# Altium footprint library PcbLib_BDD.PcbLib: 9 footprints
Each footprint in its own frame and in the unit in brackets; x right, y up, seen from the top. Pads: shape width x height; smd on the part's side, far side on the other; paste and mask are expansions set on the pad; w line width, h text height; cw(c..) or ccw(c..) is an arc to the next point about the centre after c.
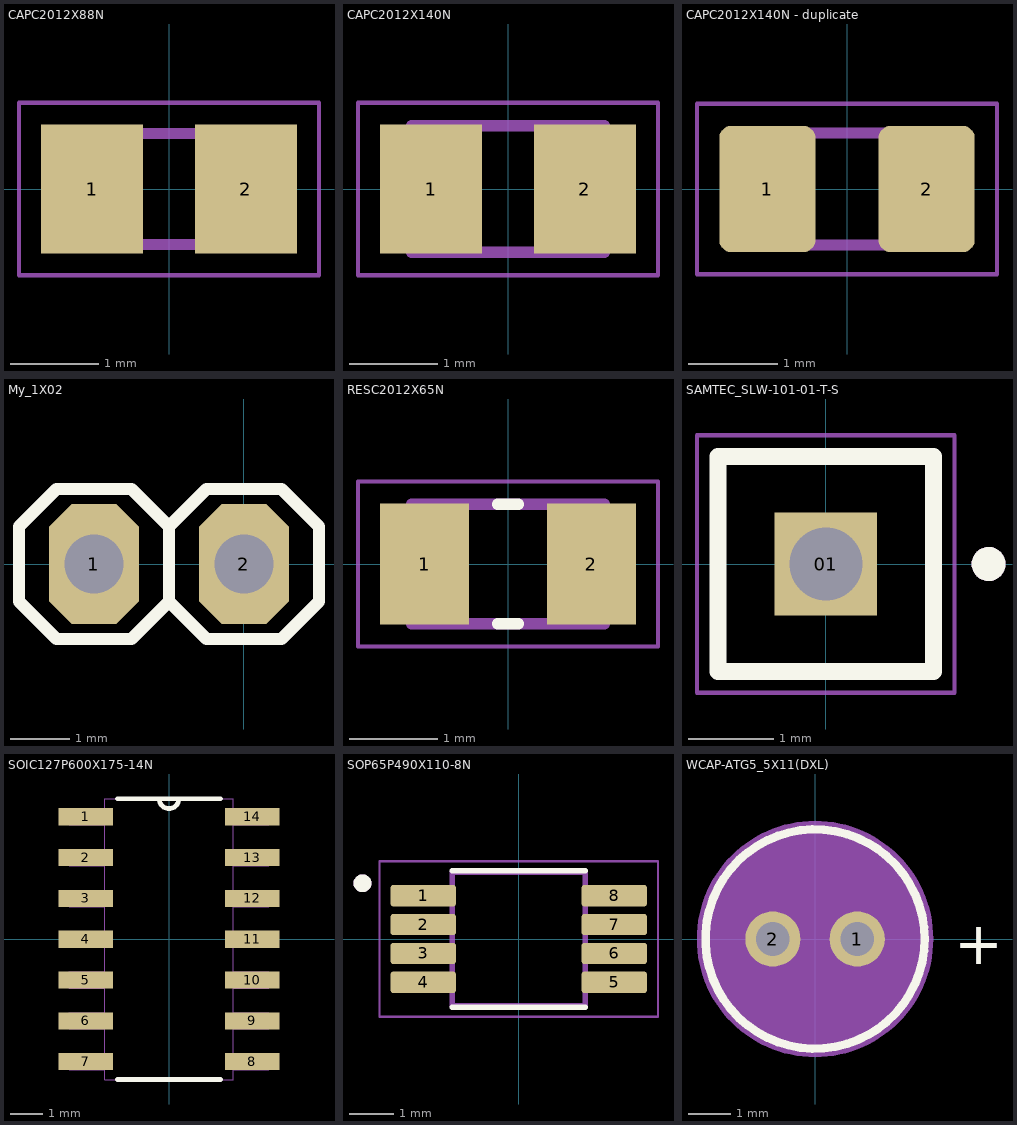
[diagram p0: the footprints below, top view; thin cyan lines are the x and y axes]

## CAPC2012X88N [mm]
pads (2):
  rect 1.16x1.47 smd: 1(-0.875,0) 2(0.875,0)
Mechanical 13:
  lines w0.127: -1,-0.63 -1,0.63 1,0.63 1,-0.63 -1,-0.63
Mechanical 15:
  lines w0.05: -1.708,-0.983 -1.708,0.983 1.708,0.983 1.708,-0.983 -1.708,-0.983
3D body "step_temp.STEP": height 0.88, standoff 0, extent -1,-0.625 1,0.625

## CAPC2012X140N [mm]
pads (2):
  rect 1.16x1.47 smd: 1(-0.875,0) 2(0.875,0)
Mechanical 13:
  lines w0.127: -1.1,-0.72 -1.1,0.72 1.1,0.72 1.1,-0.72 -1.1,-0.72
Mechanical 15:
  lines w0.05: -1.708,-0.983 -1.708,0.983 1.708,0.983 1.708,-0.983 -1.708,-0.983
3D body "step_temp.STEP": height 0.88, standoff 0, extent -1,-0.625 1,0.625

## CAPC2012X140N - duplicate [mm]
pads (2):
  rrect25% 1.08x1.42 smd: 1(-0.895,0) 2(0.895,0)
Mechanical 13:
  lines w0.127: -1,-0.63 -1,0.63 1,0.63 1,-0.63 -1,-0.63
Mechanical 15:
  lines w0.05: -1.685,-0.96 -1.685,0.96 1.685,0.96 1.685,-0.96 -1.685,-0.96
3D body "step_temp.STEP": height 1.4, standoff 0, extent -1,-0.625 1,0.625

## My_1X02 [mil]
pads (2):
  oct 60x80 hole 39.37: 1(-100,0) 2(0,0)
Top Overlay:
  lines w8: -50,-25 -25,-50 25,-50 50,-25 50,25 25,50 -25,50 -50,25 ; -50,-25 -75,-50 -125,-50 -150,-25 -150,25 -125,50 -75,50 -50,25 ; -50,-25 -50,25
3D body "pin_header_aw140-eg-g02d.stp": height 323.43, standoff -117.51, extent -150,-51.21 46.07,47.22

## RESC2012X65N [mm]
pads (2):
  rect 1.01x1.38 smd: 1(-0.95,0) 2(0.95,0)
Top Overlay:
  lines w0.127: -0.12,-0.68 0.12,-0.68 ; -0.12,0.68 0.12,0.68
Mechanical 13:
  lines w0.127: -1.1,-0.68 -1.1,0.68 1.1,0.68 1.1,-0.68 -1.1,-0.68
Mechanical 15:
  lines w0.05: -1.708,-0.94 -1.708,0.94 1.708,0.94 1.708,-0.94 -1.708,-0.94

## SAMTEC_SLW-101-01-T-S [mm]
pads (1):
  rect 1.21x1.21 hole 0.86: 01(0,0)
Top Overlay:
  circle w0.2: c1.92,0 r0.1
  lines w0.2: -1.27,-1.27 1.27,-1.27 1.27,1.27 -1.27,1.27 -1.27,-1.27
Mechanical 13:
  circle w0.2: c1.92,0 r0.1
  lines w0.1: -1.27,-1.27 1.27,-1.27 1.27,1.27 -1.27,1.27 -1.27,-1.27
Mechanical 15:
  lines w0.05: -1.52,-1.52 1.52,-1.52 1.52,1.52 -1.52,1.52 -1.52,-1.52

## SOIC127P600X175-14N [mil]
pads (14):
  rect 67x21 smd paste+0 mask+4.02: 1(-102,150) 2(-102,100) 3(-102,50) 4(-102,0) 5(-102,-50) 6(-102,-100) 7(-102,-150) 8(102,-150) 9(102,-100) 10(102,-50) 11(102,0) 12(102,50) 13(102,100) 14(102,150)
Top Overlay:
  lines w6: -63,-172 63,-172 ; -63,172 -12,172 ; 63,172 12,172 ; -12,172 ccw(c0,172) 12,172 ; -12,172 12,172
Mechanical 13:
  lines w0: -12,172 ccw(c0,172) 12,172 ; -12,172 -79,172 -79,-172 79,-172 79,172 12,172 ; -12,172 12,172 ; -122,-160 -79,-160 -79,-140 -122,-140 -122,-160 ; -122,-110 -79,-110 -79,-90 -122,-90 -122,-110 ; -122,-60 -79,-60 -79,-40 -122,-40 -122,-60 ; -122,-10 -79,-10 -79,10 -122,10 -122,-10 ; -122,40 -79,40 -79,60 -122,60 -122,40 ; -122,90 -79,90 -79,110 -122,110 -122,90 ; -122,140 -79,140 -79,160 -122,160 -122,140 ; 79,-160 122,-160 122,-140 79,-140 79,-160 ; 79,-110 122,-110 122,-90 79,-90 79,-110 ; 79,-60 122,-60 122,-40 79,-40 79,-60 ; 79,-10 122,-10 122,10 79,10 79,-10 ; 79,40 122,40 122,60 79,60 79,40 ; 79,90 122,90 122,110 79,110 79,90 ; 79,140 122,140 122,160 79,160 79,140
3D body "step_temp.STEP": height 68.9, standoff 0, extent -118.11,-170.28 118.11,170.28

## SOP65P490X110-8N [mm]
pads (8):
  rrect25% 1.47x0.48 smd paste+0 mask+0.102: 1(-2.15,0.975) 2(-2.15,0.325) 3(-2.15,-0.325) 4(-2.15,-0.975) 5(2.15,-0.975) 6(2.15,-0.325) 7(2.15,0.325) 8(2.15,0.975)
Top Overlay:
  circle w0.2: c-3.52,1.255 r0.1
  lines w0.127: -1.5,-1.535 1.5,-1.535 ; -1.5,1.535 1.5,1.535
Mechanical 13:
  circle w0.2: c-3.52,1.255 r0.1
  lines w0.127: -1.5,-1.5 -1.5,1.5 1.5,1.5 1.5,-1.5 -1.5,-1.5
Mechanical 15:
  lines w0.05: -3.135,-1.75 -3.135,1.75 3.135,1.75 3.135,-1.75 -3.135,-1.75
3D body "step_temp.STEP": height 1.1, standoff 0, extent -2.45,-1.5 2.45,1.5

## WCAP-ATG5_5X11(DXL) [mm]
pads (2):
  round 1.308 hole 0.8: 1(1,0) 2(-1,0)
Top Overlay:
  circle w0.2: c0,0 r2.6
  text "+" at 3.3,-0.6 h1.02
Mechanical 13:
  circle w0.1: c0,0 r2.5
  text "+" at 3.3,-0.6 h1.02
Mechanical 15:
  region: 0.147,2.796 0.293,2.785 0.438,2.766 0.582,2.739 0.725,2.705 0.865,2.663 1.003,2.614 1.139,2.558 1.271,2.495 1.4,2.425 1.525,2.348 1.646,2.265 1.762,2.176 1.874,2.081 1.98,1.98 2.081,1.874 2.176,1.762 2.265,1.646 2.348,1.525 2.425,1.4 2.495,1.271 2.558,1.139 2.614,1.003 2.663,0.865 2.705,0.725 2.739,0.582 2.766,0.438 2.785,0.293 2.796,0.147 2.8,0 2.796,-0.147 2.785,-0.293 2.766,-0.438 2.739,-0.582 2.705,-0.725 2.663,-0.865 2.614,-1.003 2.558,-1.139 2.495,-1.271 2.425,-1.4 2.348,-1.525 2.265,-1.646 2.176,-1.762 2.081,-1.874 1.98,-1.98 1.874,-2.081 1.762,-2.176 1.646,-2.265 1.525,-2.348 1.4,-2.425 1.271,-2.495 1.139,-2.558 1.003,-2.614 0.865,-2.663 0.725,-2.705 0.582,-2.739 0.438,-2.766 0.293,-2.785 0.147,-2.796 0,-2.8 -0.147,-2.796 -0.293,-2.785 -0.438,-2.766 -0.582,-2.739 -0.725,-2.705 -0.865,-2.663 -1.003,-2.614 -1.139,-2.558 -1.271,-2.495 -1.4,-2.425 -1.525,-2.348 -1.646,-2.265 -1.762,-2.176 -1.874,-2.081 -1.98,-1.98 -2.081,-1.874 -2.176,-1.762 -2.265,-1.646 -2.348,-1.525 -2.425,-1.4 -2.495,-1.271 -2.558,-1.139 -2.614,-1.003 -2.663,-0.865 -2.705,-0.725 -2.739,-0.582 -2.766,-0.438 -2.785,-0.293 -2.796,-0.147 -2.8,0 -2.796,0.147 -2.785,0.293 -2.766,0.438 -2.739,0.582 -2.705,0.725 -2.663,0.865 -2.614,1.003 -2.558,1.139 -2.495,1.271 -2.425,1.4 -2.348,1.525 -2.265,1.646 -2.176,1.762 -2.081,1.874 -1.98,1.98 -1.874,2.081 -1.762,2.176 -1.646,2.265 -1.525,2.348 -1.4,2.425 -1.271,2.495 -1.139,2.558 -1.003,2.614 -0.865,2.663 -0.725,2.705 -0.582,2.739 -0.438,2.766 -0.293,2.785 -0.147,2.796 0,2.8